# Altium footprint library GSD9605YB-3V2800.PcbLib: 1 footprints
Each footprint in its own frame and in the unit in brackets; x right, y up, seen from the top. Pads: shape width x height; smd on the part's side, far side on the other; paste and mask are expansions set on the pad; w line width, h text height; cw(c..) or ccw(c..) is an arc to the next point about the centre after c.
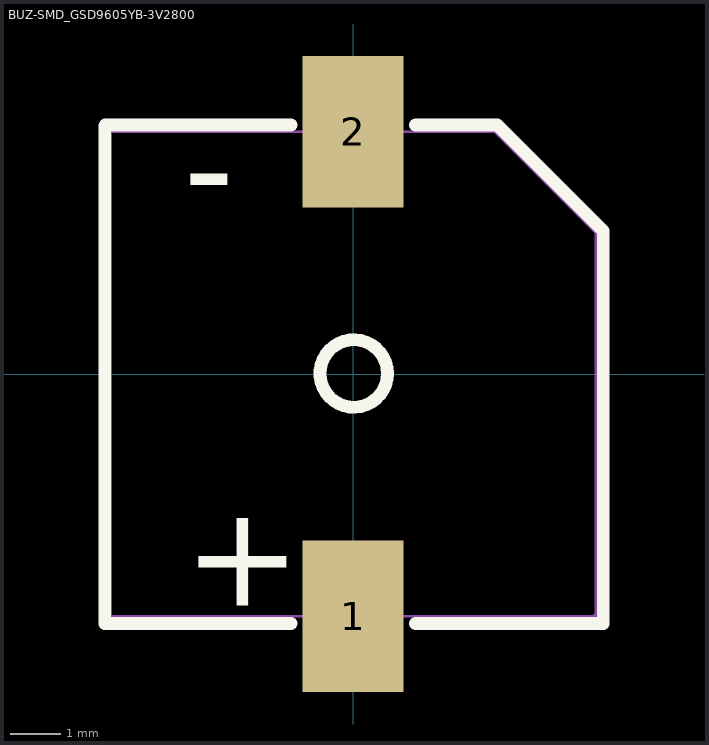
[diagram p0: the footprint, top view; thin cyan lines are the x and y axes]

## BUZ-SMD_GSD9605YB-3V2800 [mm]
pads (2):
  rect 2x3 smd: 1(0,-4.8) 2(0,4.8)
Top Overlay:
  circle w0.254: c0.01,0.01 r0.669
  lines w0.254: -4.92,4.91 -4.92,-4.94 -1.231,-4.94 ; -4.91,4.93 -1.231,4.93 ; 1.231,-4.94 4.95,-4.94 4.95,2.83 2.85,4.93 1.231,4.93
  text "-" at -3.36,3.08 h2.03
  text "+" at -3.36,-4.59 h2.03
Mechanical 2:
  region: -0.915,4.895 0.895,4.895 0.895,4.725 -0.915,4.725
  region: -0.095,-5.715 -0.095,-3.905 0.075,-3.905 0.075,-5.715
  region: -0.915,-4.705 0.895,-4.705 0.895,-4.875 -0.915,-4.875
Mechanical 6:
  lines w0.051: -4.8,-4.8 4.8,-4.8 4.8,2.8 2.8,4.8 -4.8,4.8 -4.8,-4.8
Mechanical 8:
  region: 4.86,-4.8 4.86,-4.805 4.859,-4.814 4.856,-4.823 4.851,-4.832 4.846,-4.839 4.839,-4.846 4.832,-4.851 4.823,-4.856 4.814,-4.859 4.805,-4.86 4.795,-4.86 4.786,-4.859 4.777,-4.856 4.769,-4.851 4.761,-4.846 4.754,-4.839 4.749,-4.832 4.745,-4.823 4.742,-4.814 4.74,-4.805 4.74,-4.8 4.74,-4.795 4.742,-4.786 4.745,-4.777 4.749,-4.769 4.754,-4.761 4.761,-4.754 4.769,-4.749 4.777,-4.745 4.786,-4.742 4.795,-4.74 4.805,-4.74 4.814,-4.742 4.823,-4.745 4.832,-4.749 4.839,-4.754 4.846,-4.761 4.851,-4.769 4.856,-4.777 4.859,-4.786 4.86,-4.795 4.86,-4.8
Mechanical 9:
  region: 0.75,5.15 0.75,3.65 -0.75,3.65 -0.75,5.15
  region: -0.75,-5.15 -0.75,-3.65 0.75,-3.65 0.75,-5.15